# Altium footprint library 2.10-LQFP封装.PcbLib: 97 footprints (part 3 of 7)
Each footprint in its own frame and in the unit in brackets; x right, y up, seen from the top. Pads: shape width x height; smd on the part's side, far side on the other; paste and mask are expansions set on the pad; w line width, h text height; cw(c..) or ccw(c..) is an arc to the next point about the centre after c.
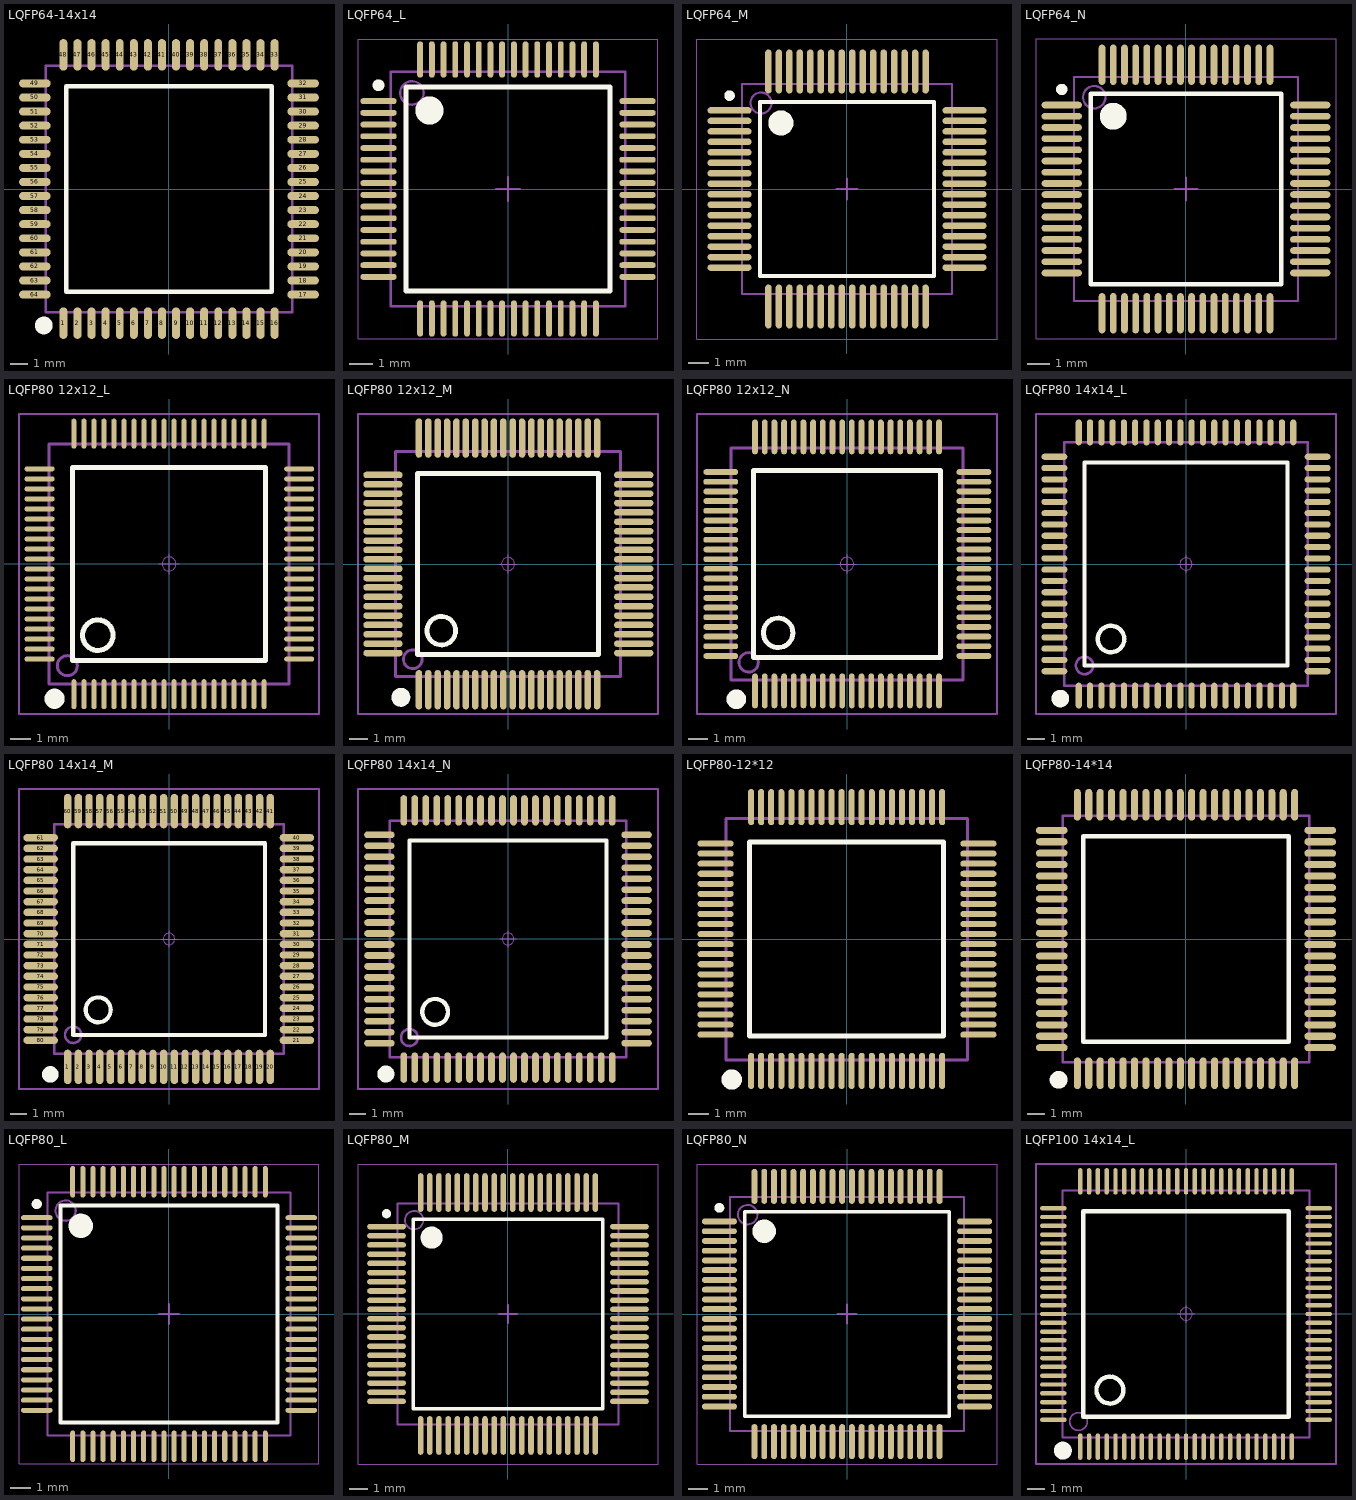
[diagram p2: the footprints below, top view; thin cyan lines are the x and y axes]

## LQFP64-14x14 [mm] "14x14mm，0.8mm       淘宝ID:黄晶宝石"
height 1.6
pads (64):
  oval 0.45x1.8 smd: 1(-6,-7.617) 2(-5.2,-7.617) 3(-4.4,-7.617) 4(-3.6,-7.617) 5(-2.8,-7.617) 6(-2,-7.617) 7(-1.2,-7.617) 8(-0.4,-7.617) 9(0.4,-7.617) 10(1.2,-7.617) 11(2,-7.617) 12(2.8,-7.617) 13(3.6,-7.617) 14(4.4,-7.617) 15(5.2,-7.617) 16(6,-7.617) 33(6,7.629) 34(5.2,7.629) 35(4.4,7.629) 36(3.6,7.629) 37(2.8,7.629) 38(2,7.629) 39(1.2,7.629) 40(0.4,7.629) 41(-0.4,7.629) 42(-1.2,7.629) 43(-2,7.629) 44(-2.8,7.629) 45(-3.6,7.629) 46(-4.4,7.629) 47(-5.2,7.629) 48(-6,7.629)
  oval 1.8x0.45 smd: 17(7.623,-5.994) 18(7.623,-5.194) 19(7.623,-4.394) 20(7.623,-3.594) 21(7.623,-2.794) 22(7.623,-1.994) 23(7.623,-1.194) 24(7.623,-0.394) 25(7.623,0.406) 26(7.623,1.206) 27(7.623,2.006) 28(7.623,2.806) 29(7.623,3.606) 30(7.623,4.406) 31(7.623,5.206) 32(7.623,6.006) 49(-7.623,6.006) 50(-7.623,5.206) 51(-7.623,4.406) 52(-7.623,3.606) 53(-7.623,2.806) 54(-7.623,2.006) 55(-7.623,1.206) 56(-7.623,0.406) 57(-7.623,-0.394) 58(-7.623,-1.194) 59(-7.623,-1.994) 60(-7.623,-2.794) 61(-7.623,-3.594) 62(-7.623,-4.394) 63(-7.623,-5.194) 64(-7.623,-5.994)
Top Overlay:
  circle w0.508: c-7.112,-7.747 r0.25
  lines w0.254: -5.842,-5.842 5.842,-5.842 5.842,5.842 -5.842,5.842 -5.842,-5.842
Mechanical 13:
  lines w0.15: -7,-6.994 -7,7.006 7,7.006 7,-6.994 -7,-6.994
3D body "LQFP64-14x14.STEP": height 1.45, standoff 0, extent -8.001,-8.003 8.005,8.003

## LQFP64_L [mm] "封装库来自淘宝 ID：黄晶宝石 Thin QFP, 64-Leads, Body 10x10mm, Pitch 0.5mm, IPC High Density"
height 1.6
pads (64):
  oval 1.55x0.25 smd: 1(-5.525,3.75) 2(-5.525,3.25) 3(-5.525,2.75) 4(-5.525,2.25) 5(-5.525,1.75) 6(-5.525,1.25) 7(-5.525,0.75) 8(-5.525,0.25) 9(-5.525,-0.25) 10(-5.525,-0.75) 11(-5.525,-1.25) 12(-5.525,-1.75) 13(-5.525,-2.25) 14(-5.525,-2.75) 15(-5.525,-3.25) 16(-5.525,-3.75) 33(5.525,-3.75) 34(5.525,-3.25) 35(5.525,-2.75) 36(5.525,-2.25) 37(5.525,-1.75) 38(5.525,-1.25) 39(5.525,-0.75) 40(5.525,-0.25) 41(5.525,0.25) 42(5.525,0.75) 43(5.525,1.25) 44(5.525,1.75) 45(5.525,2.25) 46(5.525,2.75) 47(5.525,3.25) 48(5.525,3.75)
  oval 0.25x1.55 smd: 17(-3.75,-5.525) 18(-3.25,-5.525) 19(-2.75,-5.525) 20(-2.25,-5.525) 21(-1.75,-5.525) 22(-1.25,-5.525) 23(-0.75,-5.525) 24(-0.25,-5.525) 25(0.25,-5.525) 26(0.75,-5.525) 27(1.25,-5.525) 28(1.75,-5.525) 29(2.25,-5.525) 30(2.75,-5.525) 31(3.25,-5.525) 32(3.75,-5.525) 49(3.75,5.525) 50(3.25,5.525) 51(2.75,5.525) 52(2.25,5.525) 53(1.75,5.525) 54(1.25,5.525) 55(0.75,5.525) 56(0.25,5.525) 57(-0.25,5.525) 58(-0.75,5.525) 59(-1.25,5.525) 60(-1.75,5.525) 61(-2.25,5.525) 62(-2.75,5.525) 63(-3.25,5.525) 64(-3.75,5.525)
Top Overlay:
  circle w0.6: c-3.35,3.35 r0.3
  circle w0.25: c-5.525,4.425 r0.125
  lines w0.2: -4.35,-4.35 4.35,-4.35 4.35,4.35 -4.35,4.35 -4.35,-4.35
Mechanical 13:
  circle w0.1: c-4.1,4.1 r0.5
  lines w0.1: -5,-5 5,-5 5,5 -5,5 -5,-5
Mechanical 15:
  lines w0.05: -6.4,-6.4 6.4,-6.4 6.4,6.4 -6.4,6.4 -6.4,-6.4
  lines w0.1: -0.5,0 0.5,0 ; 0,-0.5 0,0.5
3D body "LQFP64-10x10.STEP": height 1.45, standoff -0.01, extent -6.003,-6.003 6.003,6.003

## LQFP64_M [mm] "封装库来自淘宝 ID：黄晶宝石 Thin QFP, 64-Leads, Body 10x10mm, Pitch 0.5mm, IPC Low Density"
height 1.6
pads (64):
  oval 2.1x0.3 smd: 1(-5.6,3.75) 2(-5.6,3.25) 3(-5.6,2.75) 4(-5.6,2.25) 5(-5.6,1.75) 6(-5.6,1.25) 7(-5.6,0.75) 8(-5.6,0.25) 9(-5.6,-0.25) 10(-5.6,-0.75) 11(-5.6,-1.25) 12(-5.6,-1.75) 13(-5.6,-2.25) 14(-5.6,-2.75) 15(-5.6,-3.25) 16(-5.6,-3.75) 33(5.6,-3.75) 34(5.6,-3.25) 35(5.6,-2.75) 36(5.6,-2.25) 37(5.6,-1.75) 38(5.6,-1.25) 39(5.6,-0.75) 40(5.6,-0.25) 41(5.6,0.25) 42(5.6,0.75) 43(5.6,1.25) 44(5.6,1.75) 45(5.6,2.25) 46(5.6,2.75) 47(5.6,3.25) 48(5.6,3.75)
  oval 0.3x2.1 smd: 17(-3.75,-5.6) 18(-3.25,-5.6) 19(-2.75,-5.6) 20(-2.25,-5.6) 21(-1.75,-5.6) 22(-1.25,-5.6) 23(-0.75,-5.6) 24(-0.25,-5.6) 25(0.25,-5.6) 26(0.75,-5.6) 27(1.25,-5.6) 28(1.75,-5.6) 29(2.25,-5.6) 30(2.75,-5.6) 31(3.25,-5.6) 32(3.75,-5.6) 49(3.75,5.6) 50(3.25,5.6) 51(2.75,5.6) 52(2.25,5.6) 53(1.75,5.6) 54(1.25,5.6) 55(0.75,5.6) 56(0.25,5.6) 57(-0.25,5.6) 58(-0.75,5.6) 59(-1.25,5.6) 60(-1.75,5.6) 61(-2.25,5.6) 62(-2.75,5.6) 63(-3.25,5.6) 64(-3.75,5.6)
Top Overlay:
  circle w0.6: c-3.15,3.15 r0.3
  circle w0.25: c-5.6,4.45 r0.125
  lines w0.2: -4.15,-4.15 4.15,-4.15 4.15,4.15 -4.15,4.15 -4.15,-4.15
Mechanical 13:
  circle w0.1: c-4.1,4.1 r0.5
  lines w0.1: -5,-5 5,-5 5,5 -5,5 -5,-5
Mechanical 15:
  lines w0.05: -7.15,-7.15 7.15,-7.15 7.15,7.15 -7.15,7.15 -7.15,-7.15
  lines w0.1: -0.5,0 0.5,0 ; 0,-0.5 0,0.5
3D body "LQFP64-10x10.STEP": height 1.45, standoff -0.01, extent -6.003,-6.003 6.003,6.003

## LQFP64_N [mm] "封装库来自淘宝 ID：黄晶宝石 Thin QFP, 64-Leads, Body 10x10mm, Pitch 0.5mm, IPC Medium Density"
height 1.6
pads (64):
  oval 1.8x0.3 smd: 1(-5.55,3.75) 2(-5.55,3.25) 3(-5.55,2.75) 4(-5.55,2.25) 5(-5.55,1.75) 6(-5.55,1.25) 7(-5.55,0.75) 8(-5.55,0.25) 9(-5.55,-0.25) 10(-5.55,-0.75) 11(-5.55,-1.25) 12(-5.55,-1.75) 13(-5.55,-2.25) 14(-5.55,-2.75) 15(-5.55,-3.25) 16(-5.55,-3.75) 33(5.55,-3.75) 34(5.55,-3.25) 35(5.55,-2.75) 36(5.55,-2.25) 37(5.55,-1.75) 38(5.55,-1.25) 39(5.55,-0.75) 40(5.55,-0.25) 41(5.55,0.25) 42(5.55,0.75) 43(5.55,1.25) 44(5.55,1.75) 45(5.55,2.25) 46(5.55,2.75) 47(5.55,3.25) 48(5.55,3.75)
  oval 0.3x1.8 smd: 17(-3.75,-5.55) 18(-3.25,-5.55) 19(-2.75,-5.55) 20(-2.25,-5.55) 21(-1.75,-5.55) 22(-1.25,-5.55) 23(-0.75,-5.55) 24(-0.25,-5.55) 25(0.25,-5.55) 26(0.75,-5.55) 27(1.25,-5.55) 28(1.75,-5.55) 29(2.25,-5.55) 30(2.75,-5.55) 31(3.25,-5.55) 32(3.75,-5.55) 49(3.75,5.55) 50(3.25,5.55) 51(2.75,5.55) 52(2.25,5.55) 53(1.75,5.55) 54(1.25,5.55) 55(0.75,5.55) 56(0.25,5.55) 57(-0.25,5.55) 58(-0.75,5.55) 59(-1.25,5.55) 60(-1.75,5.55) 61(-2.25,5.55) 62(-2.75,5.55) 63(-3.25,5.55) 64(-3.75,5.55)
Top Overlay:
  circle w0.25: c-5.55,4.45 r0.125
  circle w0.6: c-3.25,3.25 r0.3
  lines w0.2: -4.25,-4.25 -4.25,4.25 4.25,4.25 4.25,-4.25 -4.25,-4.25
Mechanical 13:
  circle w0.1: c-4.1,4.1 r0.5
  lines w0.1: -5,-5 -5,5 5,5 5,-5 -5,-5
Mechanical 15:
  lines w0.05: -6.7,-6.7 -6.7,6.7 6.7,6.7 6.7,-6.7 -6.7,-6.7
  lines w0.1: -0.5,0 0.5,0 ; 0,-0.5 0,0.5
3D body "LQFP64-10x10.STEP": height 1.45, standoff -0.01, extent -6.003,-6.003 6.003,6.003

## LQFP80 12x12_L [mm] "80脚，体宽12x12mm，脚距0.5mm"
height 1.6
pads (80):
  oval 0.25x1.5 smd: 1(-4.75,-6.502) 2(-4.25,-6.502) 3(-3.75,-6.502) 4(-3.25,-6.502) 5(-2.75,-6.502) 6(-2.25,-6.502) 7(-1.75,-6.502) 8(-1.25,-6.502) 9(-0.75,-6.502) 10(-0.25,-6.502) 11(0.25,-6.502) 12(0.75,-6.502) 13(1.25,-6.502) 14(1.75,-6.502) 15(2.25,-6.502) 16(2.75,-6.502) 17(3.25,-6.502) 18(3.75,-6.502) 19(4.25,-6.502) 20(4.75,-6.502) 41(4.75,6.514) 42(4.25,6.514) 43(3.75,6.514) 44(3.25,6.514) 45(2.75,6.514) 46(2.25,6.514) 47(1.75,6.514) 48(1.25,6.514) 49(0.75,6.514) 50(0.25,6.514) 51(-0.25,6.514) 52(-0.75,6.514) 53(-1.25,6.514) 54(-1.75,6.514) 55(-2.25,6.514) 56(-2.75,6.514) 57(-3.25,6.514) 58(-3.75,6.514) 59(-4.25,6.514) 60(-4.75,6.514)
  oval 1.5x0.25 smd: 21(6.502,-4.75) 22(6.502,-4.25) 23(6.502,-3.75) 24(6.502,-3.25) 25(6.502,-2.75) 26(6.502,-2.25) 27(6.502,-1.75) 28(6.502,-1.25) 29(6.502,-0.75) 30(6.502,-0.25) 31(6.502,0.25) 32(6.502,0.75) 33(6.502,1.25) 34(6.502,1.75) 35(6.502,2.25) 36(6.502,2.75) 37(6.502,3.25) 38(6.502,3.75) 39(6.502,4.25) 40(6.502,4.75) 61(-6.467,4.75) 62(-6.467,4.25) 63(-6.467,3.75) 64(-6.467,3.25) 65(-6.467,2.75) 66(-6.467,2.25) 67(-6.467,1.75) 68(-6.467,1.25) 69(-6.467,0.75) 70(-6.467,0.25) 71(-6.467,-0.25) 72(-6.467,-0.75) 73(-6.467,-1.25) 74(-6.467,-1.75) 75(-6.467,-2.25) 76(-6.467,-2.75) 77(-6.467,-3.25) 78(-6.467,-3.75) 79(-6.467,-4.25) 80(-6.467,-4.75)
Top Overlay:
  circle w0.254: c-3.556,-3.556 r0.762
  circle w0.508: c-5.715,-6.731 r0.25
  lines w0.254: -4.826,-4.826 4.826,-4.826 4.826,4.826 -4.826,4.826 -4.826,-4.826
Mechanical 13:
  circle w0.15: c-5.08,-5.08 r0.5
  lines w0.15: -6,-6 6,-6 6,6 -6,6 -6,-6
Mechanical 15:
  circle w0.05: c0,0 r0.35
  lines w0.05: -0.5,0 0.5,0 ; 0,-0.5 0,0.5
  lines w0.1: -7.493,-7.493 7.493,-7.493 7.493,7.493 -7.493,7.493 -7.493,-7.493
3D body "LQFP80-12x12.STEP": height 1.45, standoff -0.01, extent -7.003,-7.003 7.003,7.003

## LQFP80 12x12_M [mm] "80脚，体宽12x12mm，脚距0.5mm"
height 1.6
pads (80):
  oval 0.35x2.1 smd: 1(-4.75,-6.706) 2(-4.25,-6.706) 3(-3.75,-6.706) 4(-3.25,-6.706) 5(-2.75,-6.706) 6(-2.25,-6.706) 7(-1.75,-6.706) 8(-1.25,-6.706) 9(-0.75,-6.706) 10(-0.25,-6.706) 11(0.25,-6.706) 12(0.75,-6.706) 13(1.25,-6.706) 14(1.75,-6.706) 15(2.25,-6.706) 16(2.75,-6.706) 17(3.25,-6.706) 18(3.75,-6.706) 19(4.25,-6.706) 20(4.75,-6.706) 41(4.75,6.717) 42(4.25,6.717) 43(3.75,6.717) 44(3.25,6.717) 45(2.75,6.717) 46(2.25,6.717) 47(1.75,6.717) 48(1.25,6.717) 49(0.75,6.717) 50(0.25,6.717) 51(-0.25,6.717) 52(-0.75,6.717) 53(-1.25,6.717) 54(-1.75,6.717) 55(-2.25,6.717) 56(-2.75,6.717) 57(-3.25,6.717) 58(-3.75,6.717) 59(-4.25,6.717) 60(-4.75,6.717)
  oval 2.1x0.35 smd: 21(6.706,-4.75) 22(6.706,-4.25) 23(6.706,-3.75) 24(6.706,-3.25) 25(6.706,-2.75) 26(6.706,-2.25) 27(6.706,-1.75) 28(6.706,-1.25) 29(6.706,-0.75) 30(6.706,-0.25) 31(6.706,0.25) 32(6.706,0.75) 33(6.706,1.25) 34(6.706,1.75) 35(6.706,2.25) 36(6.706,2.75) 37(6.706,3.25) 38(6.706,3.75) 39(6.706,4.25) 40(6.706,4.75) 61(-6.67,4.75) 62(-6.67,4.25) 63(-6.67,3.75) 64(-6.67,3.25) 65(-6.67,2.75) 66(-6.67,2.25) 67(-6.67,1.75) 68(-6.67,1.25) 69(-6.67,0.75) 70(-6.67,0.25) 71(-6.67,-0.25) 72(-6.67,-0.75) 73(-6.67,-1.25) 74(-6.67,-1.75) 75(-6.67,-2.25) 76(-6.67,-2.75) 77(-6.67,-3.25) 78(-6.67,-3.75) 79(-6.67,-4.25) 80(-6.67,-4.75)
Top Overlay:
  circle w0.508: c-5.715,-7.112 r0.25
  circle w0.254: c-3.556,-3.556 r0.762
  lines w0.254: -4.826,-4.826 4.826,-4.826 4.826,4.826 -4.826,4.826 -4.826,-4.826
Mechanical 13:
  circle w0.15: c-5.08,-5.08 r0.5
  lines w0.15: -6,-6 -6,6 6,6 6,-6 -6,-6
Mechanical 15:
  circle w0.05: c0,0 r0.35
  lines w0.05: -0.5,0 0.5,0 ; 0,-0.5 0,0.5
  lines w0.1: -8.001,-8.001 -8.001,8.001 8.001,8.001 8.001,-8.001 -8.001,-8.001
3D body "LQFP80-12x12.STEP": height 1.45, standoff -0.01, extent -7.003,-7.003 7.003,7.003

## LQFP80 12x12_N [mm] "80脚，体宽12x12mm，脚距0.5mm      淘宝ID:黄晶宝石"
height 1.6
pads (80):
  oval 0.3x1.8 smd: 1(-4.75,-6.553) 2(-4.25,-6.553) 3(-3.75,-6.553) 4(-3.25,-6.553) 5(-2.75,-6.553) 6(-2.25,-6.553) 7(-1.75,-6.553) 8(-1.25,-6.553) 9(-0.75,-6.553) 10(-0.25,-6.553) 11(0.25,-6.553) 12(0.75,-6.553) 13(1.25,-6.553) 14(1.75,-6.553) 15(2.25,-6.553) 16(2.75,-6.553) 17(3.25,-6.553) 18(3.75,-6.553) 19(4.25,-6.553) 20(4.75,-6.553) 41(4.75,6.564) 42(4.25,6.564) 43(3.75,6.564) 44(3.25,6.564) 45(2.75,6.564) 46(2.25,6.564) 47(1.75,6.564) 48(1.25,6.564) 49(0.75,6.564) 50(0.25,6.564) 51(-0.25,6.564) 52(-0.75,6.564) 53(-1.25,6.564) 54(-1.75,6.564) 55(-2.25,6.564) 56(-2.75,6.564) 57(-3.25,6.564) 58(-3.75,6.564) 59(-4.25,6.564) 60(-4.75,6.564)
  oval 1.8x0.3 smd: 21(6.553,-4.75) 22(6.553,-4.25) 23(6.553,-3.75) 24(6.553,-3.25) 25(6.553,-2.75) 26(6.553,-2.25) 27(6.553,-1.75) 28(6.553,-1.25) 29(6.553,-0.75) 30(6.553,-0.25) 31(6.553,0.25) 32(6.553,0.75) 33(6.553,1.25) 34(6.553,1.75) 35(6.553,2.25) 36(6.553,2.75) 37(6.553,3.25) 38(6.553,3.75) 39(6.553,4.25) 40(6.553,4.75) 61(-6.517,4.75) 62(-6.517,4.25) 63(-6.517,3.75) 64(-6.517,3.25) 65(-6.517,2.75) 66(-6.517,2.25) 67(-6.517,1.75) 68(-6.517,1.25) 69(-6.517,0.75) 70(-6.517,0.25) 71(-6.517,-0.25) 72(-6.517,-0.75) 73(-6.517,-1.25) 74(-6.517,-1.75) 75(-6.517,-2.25) 76(-6.517,-2.75) 77(-6.517,-3.25) 78(-6.517,-3.75) 79(-6.517,-4.25) 80(-6.517,-4.75)
Top Overlay:
  circle w0.508: c-5.715,-6.985 r0.25
  circle w0.254: c-3.556,-3.556 r0.762
  lines w0.254: -4.826,-4.826 4.826,-4.826 4.826,4.826 -4.826,4.826 -4.826,-4.826
Mechanical 13:
  circle w0.15: c-5.08,-5.08 r0.5
  lines w0.15: -6,-6 6,-6 6,6 -6,6 -6,-6
Mechanical 15:
  circle w0.05: c0,0 r0.35
  lines w0.05: -0.5,0 0.5,0 ; 0,-0.5 0,0.5
  lines w0.1: -7.747,-7.747 7.747,-7.747 7.747,7.747 -7.747,7.747 -7.747,-7.747
3D body "LQFP80-12x12.STEP": height 1.45, standoff -0.01, extent -7.003,-7.003 7.003,7.003

## LQFP80 14x14_L [mm] "80脚，体宽14x14mm，脚距0.65mm"
height 1.6
pads (80):
  oval 0.35x1.5 smd: 1(-6.175,-7.576) 2(-5.525,-7.576) 3(-4.875,-7.576) 4(-4.225,-7.576) 5(-3.575,-7.576) 6(-2.925,-7.576) 7(-2.275,-7.576) 8(-1.625,-7.576) 9(-0.975,-7.576) 10(-0.325,-7.576) 11(0.325,-7.576) 12(0.975,-7.576) 13(1.625,-7.576) 14(2.275,-7.576) 15(2.925,-7.576) 16(3.575,-7.576) 17(4.225,-7.576) 18(4.875,-7.576) 19(5.525,-7.576) 20(6.175,-7.576) 41(6.175,7.576) 42(5.525,7.576) 43(4.875,7.576) 44(4.225,7.576) 45(3.575,7.576) 46(2.925,7.576) 47(2.275,7.576) 48(1.625,7.576) 49(0.975,7.576) 50(0.325,7.576) 51(-0.325,7.576) 52(-0.975,7.576) 53(-1.625,7.576) 54(-2.275,7.576) 55(-2.925,7.576) 56(-3.575,7.576) 57(-4.225,7.576) 58(-4.875,7.576) 59(-5.525,7.576) 60(-6.175,7.576)
  oval 1.5x0.35 smd: 21(7.576,-6.175) 22(7.576,-5.525) 23(7.576,-4.875) 24(7.576,-4.225) 25(7.576,-3.575) 26(7.576,-2.925) 27(7.576,-2.275) 28(7.576,-1.625) 29(7.576,-0.975) 30(7.576,-0.325) 31(7.576,0.325) 32(7.576,0.975) 33(7.576,1.625) 34(7.576,2.275) 35(7.576,2.925) 36(7.576,3.575) 37(7.576,4.225) 38(7.576,4.875) 39(7.576,5.525) 40(7.576,6.175) 61(-7.576,6.175) 62(-7.576,5.525) 63(-7.576,4.875) 64(-7.576,4.225) 65(-7.576,3.575) 66(-7.576,2.925) 67(-7.576,2.275) 68(-7.576,1.625) 69(-7.576,0.975) 70(-7.576,0.325) 71(-7.576,-0.325) 72(-7.576,-0.975) 73(-7.576,-1.625) 74(-7.576,-2.275) 75(-7.576,-2.925) 76(-7.576,-3.575) 77(-7.576,-4.225) 78(-7.576,-4.875) 79(-7.576,-5.525) 80(-7.576,-6.175)
Top Overlay:
  circle w0.254: c-4.318,-4.318 r0.762
  circle w0.508: c-7.239,-7.747 r0.25
  lines w0.254: -5.842,-5.842 5.842,-5.842 5.842,5.842 -5.842,5.842 -5.842,-5.842
Mechanical 13:
  circle w0.15: c-5.842,-5.842 r0.5
  lines w0.15: -7,-7 7,-7 7,7 -7,7 -7,-7
Mechanical 15:
  circle w0.05: c0,0 r0.35
  lines w0.05: -0.5,0 0.5,0 ; 0,-0.5 0,0.5
  lines w0.1: -8.636,-8.636 8.636,-8.636 8.636,8.636 -8.636,8.636 -8.636,-8.636
3D body "LQFP80-14x14.STEP": height 1.45, standoff -0.01, extent -8.003,-8.003 8.003,8.003

## LQFP80 14x14_M [mm] "80脚，体宽14x14mm，脚距0.65mm"
height 1.6
pads (80):
  oval 0.45x2.1 smd: 1(-6.175,-7.797) 2(-5.525,-7.797) 3(-4.875,-7.797) 4(-4.225,-7.797) 5(-3.575,-7.797) 6(-2.925,-7.797) 7(-2.275,-7.797) 8(-1.625,-7.797) 9(-0.975,-7.797) 10(-0.325,-7.797) 11(0.325,-7.797) 12(0.975,-7.797) 13(1.625,-7.797) 14(2.275,-7.797) 15(2.925,-7.797) 16(3.575,-7.797) 17(4.225,-7.797) 18(4.875,-7.797) 19(5.525,-7.797) 20(6.175,-7.797) 41(6.175,7.797) 42(5.525,7.797) 43(4.875,7.797) 44(4.225,7.797) 45(3.575,7.797) 46(2.925,7.797) 47(2.275,7.797) 48(1.625,7.797) 49(0.975,7.797) 50(0.325,7.797) 51(-0.325,7.797) 52(-0.975,7.797) 53(-1.625,7.797) 54(-2.275,7.797) 55(-2.925,7.797) 56(-3.575,7.797) 57(-4.225,7.797) 58(-4.875,7.797) 59(-5.525,7.797) 60(-6.175,7.797)
  oval 2.1x0.45 smd: 21(7.797,-6.175) 22(7.797,-5.525) 23(7.797,-4.875) 24(7.797,-4.225) 25(7.797,-3.575) 26(7.797,-2.925) 27(7.797,-2.275) 28(7.797,-1.625) 29(7.797,-0.975) 30(7.797,-0.325) 31(7.797,0.325) 32(7.797,0.975) 33(7.797,1.625) 34(7.797,2.275) 35(7.797,2.925) 36(7.797,3.575) 37(7.797,4.225) 38(7.797,4.875) 39(7.797,5.525) 40(7.797,6.175) 61(-7.822,6.175) 62(-7.822,5.525) 63(-7.822,4.875) 64(-7.822,4.225) 65(-7.822,3.575) 66(-7.822,2.925) 67(-7.822,2.275) 68(-7.822,1.625) 69(-7.822,0.975) 70(-7.822,0.325) 71(-7.822,-0.325) 72(-7.822,-0.975) 73(-7.822,-1.625) 74(-7.822,-2.275) 75(-7.822,-2.925) 76(-7.822,-3.575) 77(-7.822,-4.225) 78(-7.822,-4.875) 79(-7.822,-5.525) 80(-7.822,-6.175)
Top Overlay:
  circle w0.508: c-7.239,-8.255 r0.25
  circle w0.254: c-4.318,-4.318 r0.762
  lines w0.254: -5.842,-5.842 -5.842,5.842 5.842,5.842 5.842,-5.842 -5.842,-5.842
Mechanical 13:
  circle w0.15: c-5.842,-5.842 r0.5
  lines w0.15: -7,-7 -7,7 7,7 7,-7 -7,-7
Mechanical 15:
  circle w0.05: c0,0 r0.35
  lines w0.05: -0.5,0 0.5,0 ; 0,-0.5 0,0.5
  lines w0.1: -9.144,-9.144 -9.144,9.144 9.144,9.144 9.144,-9.144 -9.144,-9.144
3D body "LQFP80-14x14.STEP": height 1.45, standoff -0.01, extent -8.003,-8.003 8.003,8.003

## LQFP80 14x14_N [mm] "80脚，体宽14x14mm，脚距0.65mm       淘宝ID:黄晶宝石"
height 1.6
pads (80):
  oval 0.4x1.8 smd: 1(-6.175,-7.623) 2(-5.525,-7.623) 3(-4.875,-7.623) 4(-4.225,-7.623) 5(-3.575,-7.623) 6(-2.925,-7.623) 7(-2.275,-7.623) 8(-1.625,-7.623) 9(-0.975,-7.623) 10(-0.325,-7.623) 11(0.325,-7.623) 12(0.975,-7.623) 13(1.625,-7.623) 14(2.275,-7.623) 15(2.925,-7.623) 16(3.575,-7.623) 17(4.225,-7.623) 18(4.875,-7.623) 19(5.525,-7.623) 20(6.175,-7.623) 41(6.175,7.623) 42(5.525,7.623) 43(4.875,7.623) 44(4.225,7.623) 45(3.575,7.623) 46(2.925,7.623) 47(2.275,7.623) 48(1.625,7.623) 49(0.975,7.623) 50(0.325,7.623) 51(-0.325,7.623) 52(-0.975,7.623) 53(-1.625,7.623) 54(-2.275,7.623) 55(-2.925,7.623) 56(-3.575,7.623) 57(-4.225,7.623) 58(-4.875,7.623) 59(-5.525,7.623) 60(-6.175,7.623)
  oval 1.8x0.4 smd: 21(7.623,-6.175) 22(7.623,-5.525) 23(7.623,-4.875) 24(7.623,-4.225) 25(7.623,-3.575) 26(7.623,-2.925) 27(7.623,-2.275) 28(7.623,-1.625) 29(7.623,-0.975) 30(7.623,-0.325) 31(7.623,0.325) 32(7.623,0.975) 33(7.623,1.625) 34(7.623,2.275) 35(7.623,2.925) 36(7.623,3.575) 37(7.623,4.225) 38(7.623,4.875) 39(7.623,5.525) 40(7.623,6.175) 61(-7.623,6.175) 62(-7.623,5.525) 63(-7.623,4.875) 64(-7.623,4.225) 65(-7.623,3.575) 66(-7.623,2.925) 67(-7.623,2.275) 68(-7.623,1.625) 69(-7.623,0.975) 70(-7.623,0.325) 71(-7.623,-0.325) 72(-7.623,-0.975) 73(-7.623,-1.625) 74(-7.623,-2.275) 75(-7.623,-2.925) 76(-7.623,-3.575) 77(-7.623,-4.225) 78(-7.623,-4.875) 79(-7.623,-5.525) 80(-7.623,-6.175)
Top Overlay:
  circle w0.254: c-4.318,-4.318 r0.762
  circle w0.508: c-7.239,-8.001 r0.25
  lines w0.254: -5.842,-5.842 5.842,-5.842 5.842,5.842 -5.842,5.842 -5.842,-5.842
Mechanical 13:
  circle w0.15: c-5.842,-5.842 r0.5
  lines w0.15: -7,-7 7,-7 7,7 -7,7 -7,-7
Mechanical 15:
  circle w0.05: c0,0 r0.35
  lines w0.05: -0.5,0 0.5,0 ; 0,-0.5 0,0.5
  lines w0.1: -8.89,-8.89 8.89,-8.89 8.89,8.89 -8.89,8.89 -8.89,-8.89
3D body "LQFP80-14x14.STEP": height 1.45, standoff -0.01, extent -8.003,-8.003 8.003,8.003

## LQFP80-12*12 [mm] "12x12mm，0.5mm       淘宝ID:黄晶宝石"
height 1.6
pads (80):
  oval 0.3x1.8 smd: 1(-4.75,-6.553) 2(-4.25,-6.553) 3(-3.75,-6.553) 4(-3.25,-6.553) 5(-2.75,-6.553) 6(-2.25,-6.553) 7(-1.75,-6.553) 8(-1.25,-6.553) 9(-0.75,-6.553) 10(-0.25,-6.553) 11(0.25,-6.553) 12(0.75,-6.553) 13(1.25,-6.553) 14(1.75,-6.553) 15(2.25,-6.553) 16(2.75,-6.553) 17(3.25,-6.553) 18(3.75,-6.553) 19(4.25,-6.553) 20(4.75,-6.553) 41(4.75,6.564) 42(4.25,6.564) 43(3.75,6.564) 44(3.25,6.564) 45(2.75,6.564) 46(2.25,6.564) 47(1.75,6.564) 48(1.25,6.564) 49(0.75,6.564) 50(0.25,6.564) 51(-0.25,6.564) 52(-0.75,6.564) 53(-1.25,6.564) 54(-1.75,6.564) 55(-2.25,6.564) 56(-2.75,6.564) 57(-3.25,6.564) 58(-3.75,6.564) 59(-4.25,6.564) 60(-4.75,6.564)
  oval 1.8x0.3 smd: 21(6.553,-4.75) 22(6.553,-4.25) 23(6.553,-3.75) 24(6.553,-3.25) 25(6.553,-2.75) 26(6.553,-2.25) 27(6.553,-1.75) 28(6.553,-1.25) 29(6.553,-0.75) 30(6.553,-0.25) 31(6.553,0.25) 32(6.553,0.75) 33(6.553,1.25) 34(6.553,1.75) 35(6.553,2.25) 36(6.553,2.75) 37(6.553,3.25) 38(6.553,3.75) 39(6.553,4.25) 40(6.553,4.75) 61(-6.517,4.75) 62(-6.517,4.25) 63(-6.517,3.75) 64(-6.517,3.25) 65(-6.517,2.75) 66(-6.517,2.25) 67(-6.517,1.75) 68(-6.517,1.25) 69(-6.517,0.75) 70(-6.517,0.25) 71(-6.517,-0.25) 72(-6.517,-0.75) 73(-6.517,-1.25) 74(-6.517,-1.75) 75(-6.517,-2.25) 76(-6.517,-2.75) 77(-6.517,-3.25) 78(-6.517,-3.75) 79(-6.517,-4.25) 80(-6.517,-4.75)
Top Overlay:
  circle w0.508: c-5.715,-6.985 r0.25
  lines w0.254: -4.826,-4.826 -4.826,4.826 4.826,4.826 4.826,-4.826 -4.826,-4.826
Mechanical 13:
  lines w0.15: -6,-6 -6,6 6,6 6,-6 -6,-6
3D body "LQFP80-12x12.STEP": height 1.45, standoff 0, extent -6.985,-7.003 7.021,7.003

## LQFP80-14*14 [mm] "14x14mm，0.65mm       淘宝ID:黄晶宝石"
height 1.6
pads (80):
  oval 0.4x1.8 smd: 1(-6.175,-7.623) 2(-5.525,-7.623) 3(-4.875,-7.623) 4(-4.225,-7.623) 5(-3.575,-7.623) 6(-2.925,-7.623) 7(-2.275,-7.623) 8(-1.625,-7.623) 9(-0.975,-7.623) 10(-0.325,-7.623) 11(0.325,-7.623) 12(0.975,-7.623) 13(1.625,-7.623) 14(2.275,-7.623) 15(2.925,-7.623) 16(3.575,-7.623) 17(4.225,-7.623) 18(4.875,-7.623) 19(5.525,-7.623) 20(6.175,-7.623) 41(6.175,7.623) 42(5.525,7.623) 43(4.875,7.623) 44(4.225,7.623) 45(3.575,7.623) 46(2.925,7.623) 47(2.275,7.623) 48(1.625,7.623) 49(0.975,7.623) 50(0.325,7.623) 51(-0.325,7.623) 52(-0.975,7.623) 53(-1.625,7.623) 54(-2.275,7.623) 55(-2.925,7.623) 56(-3.575,7.623) 57(-4.225,7.623) 58(-4.875,7.623) 59(-5.525,7.623) 60(-6.175,7.623)
  oval 1.8x0.4 smd: 21(7.623,-6.175) 22(7.623,-5.525) 23(7.623,-4.875) 24(7.623,-4.225) 25(7.623,-3.575) 26(7.623,-2.925) 27(7.623,-2.275) 28(7.623,-1.625) 29(7.623,-0.975) 30(7.623,-0.325) 31(7.623,0.325) 32(7.623,0.975) 33(7.623,1.625) 34(7.623,2.275) 35(7.623,2.925) 36(7.623,3.575) 37(7.623,4.225) 38(7.623,4.875) 39(7.623,5.525) 40(7.623,6.175) 61(-7.623,6.175) 62(-7.623,5.525) 63(-7.623,4.875) 64(-7.623,4.225) 65(-7.623,3.575) 66(-7.623,2.925) 67(-7.623,2.275) 68(-7.623,1.625) 69(-7.623,0.975) 70(-7.623,0.325) 71(-7.623,-0.325) 72(-7.623,-0.975) 73(-7.623,-1.625) 74(-7.623,-2.275) 75(-7.623,-2.925) 76(-7.623,-3.575) 77(-7.623,-4.225) 78(-7.623,-4.875) 79(-7.623,-5.525) 80(-7.623,-6.175)
Top Overlay:
  circle w0.508: c-7.239,-8.001 r0.25
  lines w0.254: -5.842,-5.842 -5.842,5.842 5.842,5.842 5.842,-5.842 -5.842,-5.842
Mechanical 13:
  lines w0.15: -7,-7 -7,7 7,7 7,-7 -7,-7
3D body "LQFP80-14x14.STEP": height 1.45, standoff 0, extent -8.003,-8.003 8.003,8.003

## LQFP80_L [mm] "Thin QFP, 80-Leads, Body 12x12mm, Pitch 0.5mm, IPC High Density"
height 1.6
pads (80):
  oval 1.55x0.25 smd: 1(-6.525,4.75) 2(-6.525,4.25) 3(-6.525,3.75) 4(-6.525,3.25) 5(-6.525,2.75) 6(-6.525,2.25) 7(-6.525,1.75) 8(-6.525,1.25) 9(-6.525,0.75) 10(-6.525,0.25) 11(-6.525,-0.25) 12(-6.525,-0.75) 13(-6.525,-1.25) 14(-6.525,-1.75) 15(-6.525,-2.25) 16(-6.525,-2.75) 17(-6.525,-3.25) 18(-6.525,-3.75) 19(-6.525,-4.25) 20(-6.525,-4.75) 41(6.525,-4.75) 42(6.525,-4.25) 43(6.525,-3.75) 44(6.525,-3.25) 45(6.525,-2.75) 46(6.525,-2.25) 47(6.525,-1.75) 48(6.525,-1.25) 49(6.525,-0.75) 50(6.525,-0.25) 51(6.525,0.25) 52(6.525,0.75) 53(6.525,1.25) 54(6.525,1.75) 55(6.525,2.25) 56(6.525,2.75) 57(6.525,3.25) 58(6.525,3.75) 59(6.525,4.25) 60(6.525,4.75)
  oval 0.25x1.55 smd: 21(-4.75,-6.525) 22(-4.25,-6.525) 23(-3.75,-6.525) 24(-3.25,-6.525) 25(-2.75,-6.525) 26(-2.25,-6.525) 27(-1.75,-6.525) 28(-1.25,-6.525) 29(-0.75,-6.525) 30(-0.25,-6.525) 31(0.25,-6.525) 32(0.75,-6.525) 33(1.25,-6.525) 34(1.75,-6.525) 35(2.25,-6.525) 36(2.75,-6.525) 37(3.25,-6.525) 38(3.75,-6.525) 39(4.25,-6.525) 40(4.75,-6.525) 61(4.75,6.525) 62(4.25,6.525) 63(3.75,6.525) 64(3.25,6.525) 65(2.75,6.525) 66(2.25,6.525) 67(1.75,6.525) 68(1.25,6.525) 69(0.75,6.525) 70(0.25,6.525) 71(-0.25,6.525) 72(-0.75,6.525) 73(-1.25,6.525) 74(-1.75,6.525) 75(-2.25,6.525) 76(-2.75,6.525) 77(-3.25,6.525) 78(-3.75,6.525) 79(-4.25,6.525) 80(-4.75,6.525)
Top Overlay:
  circle w0.6: c-4.35,4.35 r0.3
  circle w0.25: c-6.525,5.425 r0.125
  lines w0.2: -5.35,-5.35 5.35,-5.35 5.35,5.35 -5.35,5.35 -5.35,-5.35
Mechanical 13:
  circle w0.1: c-5.1,5.1 r0.5
  lines w0.1: -6,-6 6,-6 6,6 -6,6 -6,-6
Mechanical 15:
  lines w0.05: -7.4,-7.4 7.4,-7.4 7.4,7.4 -7.4,7.4 -7.4,-7.4
  lines w0.1: -0.5,0 0.5,0 ; 0,-0.5 0,0.5
3D body: height 1.6, standoff 0, extent -6,-6 6,6

## LQFP80_M [mm] "Thin QFP, 80-Leads, Body 12x12mm, Pitch 0.5mm, IPC Low Density"
height 1.6
pads (80):
  oval 2.1x0.3 smd: 1(-6.6,4.75) 2(-6.6,4.25) 3(-6.6,3.75) 4(-6.6,3.25) 5(-6.6,2.75) 6(-6.6,2.25) 7(-6.6,1.75) 8(-6.6,1.25) 9(-6.6,0.75) 10(-6.6,0.25) 11(-6.6,-0.25) 12(-6.6,-0.75) 13(-6.6,-1.25) 14(-6.6,-1.75) 15(-6.6,-2.25) 16(-6.6,-2.75) 17(-6.6,-3.25) 18(-6.6,-3.75) 19(-6.6,-4.25) 20(-6.6,-4.75) 41(6.6,-4.75) 42(6.6,-4.25) 43(6.6,-3.75) 44(6.6,-3.25) 45(6.6,-2.75) 46(6.6,-2.25) 47(6.6,-1.75) 48(6.6,-1.25) 49(6.6,-0.75) 50(6.6,-0.25) 51(6.6,0.25) 52(6.6,0.75) 53(6.6,1.25) 54(6.6,1.75) 55(6.6,2.25) 56(6.6,2.75) 57(6.6,3.25) 58(6.6,3.75) 59(6.6,4.25) 60(6.6,4.75)
  oval 0.3x2.1 smd: 21(-4.75,-6.6) 22(-4.25,-6.6) 23(-3.75,-6.6) 24(-3.25,-6.6) 25(-2.75,-6.6) 26(-2.25,-6.6) 27(-1.75,-6.6) 28(-1.25,-6.6) 29(-0.75,-6.6) 30(-0.25,-6.6) 31(0.25,-6.6) 32(0.75,-6.6) 33(1.25,-6.6) 34(1.75,-6.6) 35(2.25,-6.6) 36(2.75,-6.6) 37(3.25,-6.6) 38(3.75,-6.6) 39(4.25,-6.6) 40(4.75,-6.6) 61(4.75,6.6) 62(4.25,6.6) 63(3.75,6.6) 64(3.25,6.6) 65(2.75,6.6) 66(2.25,6.6) 67(1.75,6.6) 68(1.25,6.6) 69(0.75,6.6) 70(0.25,6.6) 71(-0.25,6.6) 72(-0.75,6.6) 73(-1.25,6.6) 74(-1.75,6.6) 75(-2.25,6.6) 76(-2.75,6.6) 77(-3.25,6.6) 78(-3.75,6.6) 79(-4.25,6.6) 80(-4.75,6.6)
Top Overlay:
  circle w0.25: c-6.6,5.45 r0.125
  circle w0.6: c-4.15,4.15 r0.3
  lines w0.2: -5.15,-5.15 -5.15,5.15 5.15,5.15 5.15,-5.15 -5.15,-5.15
Mechanical 13:
  circle w0.1: c-5.1,5.1 r0.5
  lines w0.1: -6,-6 -6,6 6,6 6,-6 -6,-6
Mechanical 15:
  lines w0.05: -8.15,-8.15 -8.15,8.15 8.15,8.15 8.15,-8.15 -8.15,-8.15
  lines w0.1: -0.5,0 0.5,0 ; 0,-0.5 0,0.5
3D body: height 1.6, standoff 0, extent -6,-6 6,6

## LQFP80_N [mm] "Thin QFP, 80-Leads, Body 12x12mm, Pitch 0.5mm, IPC Medium Density"
height 1.6
pads (80):
  oval 1.8x0.3 smd: 1(-6.55,4.75) 2(-6.55,4.25) 3(-6.55,3.75) 4(-6.55,3.25) 5(-6.55,2.75) 6(-6.55,2.25) 7(-6.55,1.75) 8(-6.55,1.25) 9(-6.55,0.75) 10(-6.55,0.25) 11(-6.55,-0.25) 12(-6.55,-0.75) 13(-6.55,-1.25) 14(-6.55,-1.75) 15(-6.55,-2.25) 16(-6.55,-2.75) 17(-6.55,-3.25) 18(-6.55,-3.75) 19(-6.55,-4.25) 20(-6.55,-4.75) 41(6.55,-4.75) 42(6.55,-4.25) 43(6.55,-3.75) 44(6.55,-3.25) 45(6.55,-2.75) 46(6.55,-2.25) 47(6.55,-1.75) 48(6.55,-1.25) 49(6.55,-0.75) 50(6.55,-0.25) 51(6.55,0.25) 52(6.55,0.75) 53(6.55,1.25) 54(6.55,1.75) 55(6.55,2.25) 56(6.55,2.75) 57(6.55,3.25) 58(6.55,3.75) 59(6.55,4.25) 60(6.55,4.75)
  oval 0.3x1.8 smd: 21(-4.75,-6.55) 22(-4.25,-6.55) 23(-3.75,-6.55) 24(-3.25,-6.55) 25(-2.75,-6.55) 26(-2.25,-6.55) 27(-1.75,-6.55) 28(-1.25,-6.55) 29(-0.75,-6.55) 30(-0.25,-6.55) 31(0.25,-6.55) 32(0.75,-6.55) 33(1.25,-6.55) 34(1.75,-6.55) 35(2.25,-6.55) 36(2.75,-6.55) 37(3.25,-6.55) 38(3.75,-6.55) 39(4.25,-6.55) 40(4.75,-6.55) 61(4.75,6.55) 62(4.25,6.55) 63(3.75,6.55) 64(3.25,6.55) 65(2.75,6.55) 66(2.25,6.55) 67(1.75,6.55) 68(1.25,6.55) 69(0.75,6.55) 70(0.25,6.55) 71(-0.25,6.55) 72(-0.75,6.55) 73(-1.25,6.55) 74(-1.75,6.55) 75(-2.25,6.55) 76(-2.75,6.55) 77(-3.25,6.55) 78(-3.75,6.55) 79(-4.25,6.55) 80(-4.75,6.55)
Top Overlay:
  circle w0.6: c-4.25,4.25 r0.3
  circle w0.25: c-6.55,5.45 r0.125
  lines w0.2: -5.25,-5.25 5.25,-5.25 5.25,5.25 -5.25,5.25 -5.25,-5.25
Mechanical 13:
  circle w0.1: c-5.1,5.1 r0.5
  lines w0.1: -6,-6 6,-6 6,6 -6,6 -6,-6
Mechanical 15:
  lines w0.05: -7.7,-7.7 7.7,-7.7 7.7,7.7 -7.7,7.7 -7.7,-7.7
  lines w0.1: -0.5,0 0.5,0 ; 0,-0.5 0,0.5
3D body: height 1.6, standoff 0, extent -6,-6 6,6

## LQFP100 14x14_L [mm] "100脚，体宽14x14mm，脚距0.5mm  淘宝ID:黄晶宝石"
height 1.6
pads (100):
  oval 0.25x1.5 smd: 1(-6,-7.525) 2(-5.5,-7.525) 3(-5,-7.525) 4(-4.5,-7.525) 5(-4,-7.525) 6(-3.5,-7.525) 7(-3,-7.525) 8(-2.5,-7.525) 9(-2,-7.525) 10(-1.5,-7.525) 11(-1,-7.525) 12(-0.5,-7.525) 13(0,-7.525) 14(0.5,-7.525) 15(1,-7.525) 16(1.5,-7.525) 17(2,-7.525) 18(2.5,-7.525) 19(3,-7.525) 20(3.5,-7.525) 21(4,-7.525) 22(4.5,-7.525) 23(5,-7.525) 24(5.5,-7.525) 25(6,-7.525) 51(6,7.525) 52(5.5,7.525) 53(5,7.525) 54(4.5,7.525) 55(4,7.525) 56(3.5,7.525) 57(3,7.525) 58(2.5,7.525) 59(2,7.525) 60(1.5,7.525) 61(1,7.525) 62(0.5,7.525) 63(0,7.525) 64(-0.5,7.525) 65(-1,7.525) 66(-1.5,7.525) 67(-2,7.525) 68(-2.5,7.525) 69(-3,7.525) 70(-3.5,7.525) 71(-4,7.525) 72(-4.5,7.525) 73(-5,7.525) 74(-5.5,7.525) 75(-6,7.525)
  oval 1.5x0.25 smd: 26(7.525,-6) 27(7.525,-5.5) 28(7.525,-5) 29(7.525,-4.5) 30(7.525,-4) 31(7.525,-3.5) 32(7.525,-3) 33(7.525,-2.5) 34(7.525,-2) 35(7.525,-1.5) 36(7.525,-1) 37(7.525,-0.5) 38(7.525,0) 39(7.525,0.5) 40(7.525,1) 41(7.525,1.5) 42(7.525,2) 43(7.525,2.5) 44(7.525,3) 45(7.525,3.5) 46(7.525,4) 47(7.525,4.5) 48(7.525,5) 49(7.525,5.5) 50(7.525,6) 76(-7.525,6) 77(-7.525,5.5) 78(-7.525,5) 79(-7.525,4.5) 80(-7.525,4) 81(-7.525,3.5) 82(-7.525,3) 83(-7.525,2.5) 84(-7.525,2) 85(-7.525,1.5) 86(-7.525,1) 87(-7.525,0.5) 88(-7.525,0) 89(-7.525,-0.5) 90(-7.525,-1) 91(-7.525,-1.5) 92(-7.525,-2) 93(-7.525,-2.5) 94(-7.525,-3) 95(-7.525,-3.5) 96(-7.525,-4) 97(-7.525,-4.5) 98(-7.525,-5) 99(-7.525,-5.5) 100(-7.525,-6)
Top Overlay:
  circle w0.508: c-6.985,-7.747 r0.25
  circle w0.254: c-4.318,-4.318 r0.762
  lines w0.254: -5.842,-5.842 -5.842,5.842 5.842,5.842 5.842,-5.842 -5.842,-5.842
Mechanical 13:
  circle w0.1: c-6.1,-6.1 r0.5
  lines w0.1: -7,-7 -7,7 7,7 7,-7 -7,-7
Mechanical 15:
  circle w0.05: c0,0 r0.35
  lines w0.05: -0.5,0 0.5,0 ; 0,-0.5 0,0.5
  lines w0.1: -8.509,-8.509 -8.509,8.509 8.509,8.509 8.509,-8.509 -8.509,-8.509
3D body "LQFP100-14x14.STEP": height 1.45, standoff -0.01, extent -8.003,-8.003 8.003,8.003